# Altium footprint library Espressif Microcontrollers.PcbLib: 10 footprints
Each footprint in its own frame and in the unit in brackets; x right, y up, seen from the top. Pads: shape width x height; smd on the part's side, far side on the other; paste and mask are expansions set on the pad; w line width, h text height; cw(c..) or ccw(c..) is an arc to the next point about the centre after c.
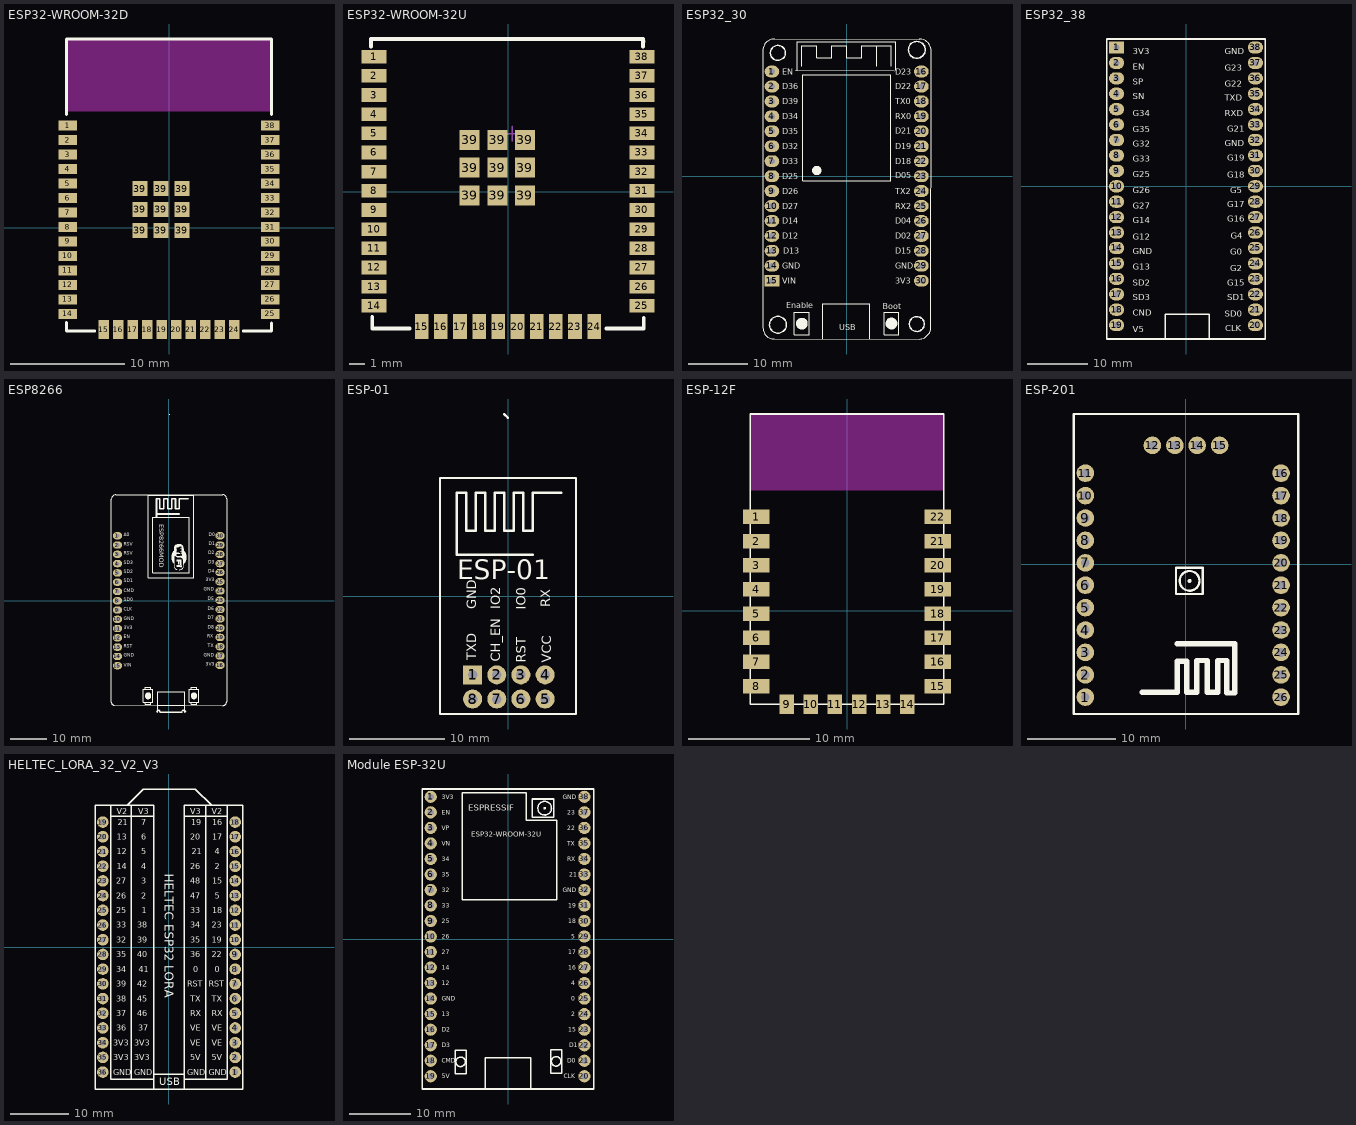
[diagram p0: the footprints below, top view; thin cyan lines are the x and y axes]

## ESP32-WROOM-32D [mm] "Chip SMD 39 Pads 18x25.5mm w/ Antenna."
pads (47):
  rect 1.65x0.9 smd: 1(-8.875,8.943) 2(-8.875,7.673) 3(-8.875,6.403) 4(-8.875,5.133) 5(-8.875,3.863) 6(-8.875,2.593) 7(-8.875,1.323) 8(-8.875,0.053) 9(-8.875,-1.217) 10(-8.875,-2.487) 11(-8.875,-3.757) 12(-8.875,-5.027) 13(-8.875,-6.297) 14(-8.875,-7.567) 25(8.875,-7.567) 26(8.875,-6.297) 27(8.875,-5.027) 28(8.875,-3.757) 29(8.875,-2.487) 30(8.875,-1.217) 31(8.875,0.053) 32(8.875,1.323) 33(8.875,2.593) 34(8.875,3.863) 35(8.875,5.133) 36(8.875,6.403) 37(8.875,7.673) 38(8.875,8.943)
  rect 0.9x1.65 smd: 15(-5.72,-8.942) 16(-4.45,-8.942) 17(-3.18,-8.942) 18(-1.91,-8.942) 19(-0.64,-8.942) 20(0.63,-8.942) 21(1.9,-8.942) 22(3.17,-8.942) 23(4.44,-8.942) 24(5.71,-8.942)
  rect 1.33x1.33 smd: 39(-2.544,-0.244) 39(-2.544,1.591) 39(-2.544,3.426) 39(-0.709,-0.244) 39(-0.709,1.591) 39(-0.709,3.426) 39(1.126,-0.244) 39(1.126,1.591) 39(1.126,3.426)
Top Overlay:
  lines w0.254: -9,9.933 -9,16.537 9,16.537 9,9.933 ; -6.514,-9.067 -9,-9.067 -9,-8.303 ; 6.509,-9.067 9,-9.067 9,-8.378 ; -9,-8.303 ccw(c-9,-8.303) -9,-8.303 ; 9.001,-8.377 ccw(c9.001,-8.378) 9,-8.378
Keep-Out Layer:
  rectangle: -9,10.168 9,16.468
3D body "ESP32-WROOM-32D.step": height 3, standoff -0.04, extent -9.03,-9.052 9.04,16.488

## ESP32-WROOM-32U [mm] "Chip SMD 39 Pads 18x19.2mm w/o Antenna."
pads (47):
  rect 1.65x0.9 smd: 1(-8.875,8.943) 2(-8.875,7.673) 3(-8.875,6.403) 4(-8.875,5.133) 5(-8.875,3.863) 6(-8.875,2.593) 7(-8.875,1.323) 8(-8.875,0.053) 9(-8.875,-1.217) 10(-8.875,-2.487) 11(-8.875,-3.757) 12(-8.875,-5.027) 13(-8.875,-6.297) 14(-8.875,-7.567) 25(8.875,-7.567) 26(8.875,-6.297) 27(8.875,-5.027) 28(8.875,-3.757) 29(8.875,-2.487) 30(8.875,-1.217) 31(8.875,0.053) 32(8.875,1.323) 33(8.875,2.593) 34(8.875,3.863) 35(8.875,5.133) 36(8.875,6.403) 37(8.875,7.673) 38(8.875,8.943)
  rect 0.9x1.65 smd: 15(-5.72,-8.942) 16(-4.45,-8.942) 17(-3.18,-8.942) 18(-1.91,-8.942) 19(-0.64,-8.942) 20(0.63,-8.942) 21(1.9,-8.942) 22(3.17,-8.942) 23(4.44,-8.942) 24(5.71,-8.942)
  rect 1.33x1.33 smd: 39(-2.544,-0.244) 39(-2.544,1.591) 39(-2.544,3.426) 39(-0.709,-0.244) 39(-0.709,1.591) 39(-0.709,3.426) 39(1.126,-0.244) 39(1.126,1.591) 39(1.126,3.426)
Top Overlay:
  lines w0.254: -9.07,9.605 -9.07,10.114 8.93,10.114 ; -6.514,-9.067 -9,-9.067 -9,-8.303 ; 6.509,-9.067 9,-9.067 9,-8.378 ; 8.947,9.605 8.947,10.114 ; -9,-8.303 ccw(c-9,-8.303) -9,-8.303 ; 9.001,-8.377 ccw(c9.001,-8.378) 9,-8.378
Mechanical 1:
  lines w0.254: 8.877,10.068 9.004,9.941
Top Component Center:
  lines w0.1: -0.209,3.831 0.791,3.831 ; 0.291,3.331 0.291,4.331
3D body "ESP32-WROOM-32U.step": height 3.4, standoff -0.04, extent -9.069,-9.105 9.001,10.135

## ESP32_30 [mm] "Microcontoller Board 30 Pins Wifi 2.4GHz BLE 4.2 ESP32-WROOM-32D"
pads (30):
  oval 2.5x2 hole 1: 1(-12.7,17.78) 2(-12.7,15.24) 3(-12.7,12.7) 4(-12.7,10.16) 5(-12.7,7.62) 6(-12.7,5.08) 7(-12.7,2.54) 8(-12.7,0) 9(-12.7,-2.54) 10(-12.7,-5.08) 11(-12.7,-7.62) 12(-12.7,-10.16) 13(-12.7,-12.7) 14(-12.7,-15.24) 16(12.7,17.78) 17(12.7,15.24) 18(12.7,12.7) 19(12.7,10.16) 20(12.7,7.62) 21(12.7,5.08) 22(12.7,2.54) 23(12.7,0) 24(12.7,-2.54) 25(12.7,-5.08) 26(12.7,-7.62) 27(12.7,-10.16) 28(12.7,-12.7) 29(12.7,-15.24) 30(12.7,-17.78)
  rect 2.5x2 hole 1: 15(-12.7,-17.78)
Top Overlay:
  circle w0.254: c-11.684,-25.273 r1.437
  circle w0.254: c-11.684,20.955 r1.27
  circle w0.254: c11.938,21.463 r1.437
  circle w0.254: c11.938,-25.146 r1.27
  lines w0.12: -14.234,21.59 -14.224,-25.755 ; -14.234,21.591 cw(c-12.254,21.312) -12.254,23.312 12.312,23.294 cw(c12.373,21.296) 14.351,21.59 14.319,-25.655 cw(c12.319,-25.686) 12.319,-27.686 -12.291,-27.684 cw(c-12.321,-25.78) -14.225,-25.755 ; -8.636,18.034 8.128,17.949 ; -8.382,18.034 -8.382,22.86 8.382,22.86 8.382,18.034 ; -7.62,18.638 -7.62,22.194 -5.08,22.194 -5.08,20.162 -2.54,20.162 -2.54,22.194 0,22.194 0,20.162 2.54,20.162 2.54,22.194 7.62,22.194 7.62,18.638 ; -4.064,-27.686 -4.064,-21.686 3.936,-21.686 3.936,-27.686 ; 5.08,18.638 5.08,22.194 ; -8.89,-26.924 -8.89,-23.114 -6.35,-23.114 -6.35,-26.924 -8.89,-26.924 ; -7.5,-0.774 -7.5,17.226 7.5,17.226 7.5,-0.774 -7.5,-0.774 ; 6.35,-26.924 6.35,-23.114 8.89,-23.114 8.89,-26.924 6.35,-26.924
  lines w0.8: -4.68,0.956 cw(c-5.08,0.958) -4.68,0.96
  lines w1: -7.12,-25.08 cw(c-7.62,-25.078) -7.12,-25.075 ; 8.12,-25.08 cw(c7.621,-25.055) 8.12,-25.075
  text "RX0" at 8.255,9.652 h1
  text "TX0" at 8.255,12.192 h1
  text "D22" at 8.255,14.732 h1
  text "D21" at 8.255,7.239 h1
  text "D18" at 8.255,2.032 h1
  text "D05" at 8.255,-0.381 h1
  text "D19" at 8.255,4.572 h1
  text "D25" at -10.922,-0.508 h1
  text "D33" at -10.922,2.032 h1
  text "D35" at -10.922,7.112 h1
  text "D34" at -10.922,9.652 h1
  text "D32" at -10.922,4.572 h1
  text "D26" at -10.922,-3.048 h1
  text "D13" at -10.795,-13.208 h1
  text "D27" at -10.922,-5.588 h1
  text "D14" at -10.922,-8.128 h1
  text "GND" at -10.922,-15.748 h1
  text "VIN" at -10.922,-18.288 h1
  text "D12" at -10.922,-10.668 h1
  text "D39" at -10.922,12.192 h1
  text "3V3" at 8.255,-18.288 h1
  text "D04" at 8.255,-8.128 h1
  text "GND" at 8.255,-15.748 h1
  text "D02" at 8.255,-10.668 h1
  text "D15" at 8.255,-13.208 h1
  text "RX2" at 8.255,-5.588 h1
  text "TX2" at 8.255,-3.048 h1
  text "D36" at -10.922,14.732 h1
  text "D23" at 8.255,17.272 h1
  text "EN" at -10.922,17.272 h1
  text "USB" at -1.27,-26.162 h1
  text "Boot" at 6.096,-22.606 h1
  text "Enable" at -10.287,-22.479 h1
3D body "ESP32_30.STEP": height 7, standoff -5.5, extent -14.149,-27.608 14.351,23.29

## ESP32_38 [mm] "Microcontoller Board 38 Pins Wifi 2.4GHz BLE 4.2 ESP32-WROOM-32D"
pads (38):
  rect 2.5x2 hole 1: 1(-11.43,22.86)
  oval 2.5x2 hole 1: 2(-11.43,20.32) 3(-11.43,17.78) 4(-11.43,15.24) 5(-11.43,12.7) 6(-11.43,10.16) 7(-11.43,7.62) 8(-11.43,5.08) 9(-11.43,2.54) 10(-11.43,0) 11(-11.43,-2.54) 12(-11.43,-5.08) 13(-11.43,-7.62) 14(-11.43,-10.16) 15(-11.43,-12.7) 16(-11.43,-15.24) 17(-11.43,-17.78) 18(-11.43,-20.32) 19(-11.43,-22.86) 20(11.43,-22.86) 21(11.43,-20.32) 22(11.43,-17.78) 23(11.43,-15.24) 24(11.43,-12.7) 25(11.43,-10.16) 26(11.43,-7.62) 27(11.43,-5.08) 28(11.43,-2.54) 29(11.43,0) 30(11.43,2.54) 31(11.43,5.08) 32(11.43,7.62) 33(11.43,10.16) 34(11.43,12.7) 35(11.43,15.24) 36(11.43,17.78) 37(11.43,20.32) 38(11.43,22.86)
Top Overlay:
  lines w0.254: 12.954,-25.146 -13.081,-25.146 -13.081,24.257 13.081,24.257 13.081,-25.146 ; -3.429,-25.146 -3.429,-21.082 3.81,-21.082 3.81,-25.146 -3.429,-25.146
  text "CND" at -8.763,-21.336 h1.02
  text "G13" at -8.763,-13.716 h1.02
  text "G12" at -8.763,-8.763 h1.02
  text "GND" at -8.763,-11.176 h1.02
  text "V5" at -8.763,-24.003 h1.02
  text "G16" at 6.812,-5.842 h1.02
  text "G4" at 7.388,-8.619 h1.02
  text "G18" at 6.767,1.397 h1.02
  text "G17" at 6.767,-3.429 h1.02
  text "G21" at 6.767,9.017 h1.02
  text "GND" at 6.35,6.604 h1.02
  text "G19" at 6.812,4.191 h1.02
  text "G5" at 7.302,-1.143 h1.02
  text "G23" at 6.35,19.05 h1.02
  text "GND" at 6.35,21.717 h1.02
  text "EN" at -8.763,19.177 h1.02
  text "3V3" at -8.763,21.717 h1.02
  text "G0" at 7.302,-11.303 h1.02
  text "G15" at 6.767,-16.383 h1.02
  text "SD1" at 6.812,-18.796 h1.02
  text "G2" at 7.302,-13.97 h1.02
  text "RXD" at 6.396,11.557 h1.02
  text "G22" at 6.35,16.383 h1.02
  text "TXD" at 6.396,14.097 h1.02
  text "G25" at -8.763,1.524 h1.02
  text "G33" at -8.763,4.064 h1.02
  text "G27" at -8.763,-3.683 h1.02
  text "G26" at -8.763,-1.143 h1.02
  text "G14" at -8.763,-6.096 h1.02
  text "G34" at -8.763,11.557 h1.02
  text "SN" at -8.763,14.351 h1.02
  text "G35" at -8.763,8.89 h1.02
  text "CLK" at 6.444,-23.876 h1.02
  text "SD0" at 6.396,-21.463 h1.02
  text "G32" at -8.763,6.477 h1.02
  text "SD2" at -8.763,-16.383 h1.02
  text "SD3" at -8.763,-18.796 h1.02
  text "SP" at -8.763,16.764 h1.02
3D body "User Library-ESP32S Dev Board 0_9inch width ASSY.step": height 7.2, standoff -5.94, extent -12.954,-25.038 12.954,24.276

## ESP8266 [mm] "Microcontoller Board 30 Pins Wifi 2.4GHz BLE 4.2 ESP-12F"
pads (30):
  oval 2.5x2 hole 1: 1(-14.034,17.78) 2(-14.034,15.24) 3(-14.034,12.7) 4(-14.034,10.16) 5(-14.034,7.62) 6(-14.034,5.08) 7(-14.034,2.54) 8(-14.034,0) 9(-14.034,-2.54) 10(-14.034,-5.08) 11(-14.034,-7.62) 12(-14.034,-10.16) 13(-14.034,-12.7) 14(-14.034,-15.24) 15(-14.034,-17.78) 16(14.034,-17.653) 17(14.034,-15.113) 18(14.034,-12.573) 19(14.034,-10.033) 20(14.034,-7.493) 21(14.034,-4.953) 22(14.034,-2.413) 23(14.034,0.127) 24(14.034,2.667) 25(14.034,5.207) 26(14.034,7.747) 27(14.034,10.16) 28(14.034,12.7) 29(14.034,15.24) 30(14.034,17.78)
Top Overlay:
  drawing of 96 lines, arcs and shapes, not listed
  text "RSV" at -12.383,12.125 h1.52
  text "3V3" at 10.096,4.886 h1.52
  text "TX" at 10.731,-13.148 h1.52
  text "RX" at 10.604,-10.608 h1.52
  text "D8" at 10.731,-8.068 h1.52
  text "D7" at 10.731,-5.528 h1.52
  text "D6" at 10.731,-2.988 h1.52
  text "D2" at 10.858,12.252 h1.52
  text "D5" at 10.731,-0.321 h1.52
  text "D4" at 10.858,7.299 h1.52
  text "D3" at 10.858,9.712 h1.52
  text "D1" at 10.986,14.792 h1.52
  text "D0" at 10.986,17.205 h1.52
  text "GND" at 9.588,2.346 h1.52
  text "GND" at 9.588,-15.688 h1.52
  text "3V3" at 10.096,-18.228 h1.52
  text "VIN" at -12.383,-18.482 h1.52
  text "GND" at -12.383,-15.688 h1.52
  text "RST" at -12.383,-13.275 h1.52
  text "EN" at -12.383,-10.735 h1.52
  text "3V3" at -12.383,-8.195 h1.52
  text "GND" at -12.383,-5.782 h1.52
  text "CLK" at -12.383,-3.115 h1.52
  text "SD0" at -12.383,-0.575 h1.52
  text "CMD" at -12.383,1.965 h1.52
  text "SD1" at -12.383,4.632 h1.52
  text "SD2" at -12.383,7.045 h1.52
  text "SD3" at -12.383,9.585 h1.52
  text "RSV" at -12.383,14.665 h1.52
  text "A0" at -12.383,17.205 h1.52
  text "ESP8266MOD" at -2.594,20.955 h1.25
3D body "ESP8266.STEP": height 7.12, standoff -3.02, extent -15.689,-30.946 15.811,29.034

## ESP-01 [mm] "Microcontoller Board 8 Pins Wifi 2.4GHz BLE 4.2 ESP8266EX"
pads (8):
  rect 2x2 hole 1: 1(-3.721,-8.292)
  round 2 hole 1: 2(-1.181,-8.292) 3(1.359,-8.292) 4(3.899,-8.292) 5(3.899,-10.832) 6(1.359,-10.832) 7(-1.181,-10.832) 8(-3.721,-10.832)
Top Overlay:
  lines w0.254: -0.406,19.137 -0.025,18.756 ; 2.614,4.347 -5.386,4.347 -5.386,10.847 -4.386,10.847 -4.386,6.847 -3.386,6.847 -3.386,10.847 -2.386,10.847 -2.386,6.847 -1.386,6.847 -1.386,10.847 -0.386,10.847 -0.386,6.847 0.614,6.847 0.614,10.847 1.614,10.847 1.614,6.847 2.614,6.847 2.614,10.847 5.614,10.847 ; -7.15,-12.406 -7.15,4.739 -7.15,12.406 7.15,12.406 7.15,-12.406 -7.15,-12.406
  text "VCC" at 4.547,-7.025 h1.02
  text "RST" at 1.88,-7.025 h1.02
  text "CH_EN" at -0.829,-6.898 h1.02
  text "TXD" at -3.327,-6.771 h1.02
  text "ESP-01" at -5.333,1.764 h2.03
  text "RX" at 4.42,-1.183 h1.02
  text "IO0" at 1.88,-1.437 h1.02
  text "IO2" at -0.818,-1.401 h1.02
  text "GND" at -3.327,-1.375 h1.02
3D body "ESP-01.step": height 5.88, standoff -5.8, extent -7.264,-12.313 7.236,12.487

## ESP-12F [mm] "Chip SMD 22 Pads 16x24mm w/ Antenna."
pads (22):
  rect 2.2x1.2 smd: 1(-7.5,7.75) 2(-7.5,5.75) 3(-7.5,3.75) 4(-7.5,1.75) 5(-7.5,-0.25) 6(-7.5,-2.25) 7(-7.5,-4.25) 8(-7.5,-6.25) 15(7.5,-6.25) 16(7.5,-4.25) 17(7.5,-2.25) 18(7.5,-0.25) 19(7.5,1.75) 20(7.5,3.75) 21(7.5,5.75) 22(7.5,7.75)
  rect 1.2x1.6 smd: 9(-5,-7.75) 10(-3,-7.75) 11(-1,-7.75) 12(1,-7.75) 13(3,-7.75) 14(5,-7.75)
Top Overlay:
  lines w0.127: -8,-7.75 8,-7.75 8,16.25 -8,16.25 -8,-7.75
Keep-Out Layer:
  rectangle: -8,9.916 8,16.216
3D body "ESP-12F.step": height 2.85, standoff -0.01, extent -8.019,-7.799 8.001,16.211

## ESP-201 [mm]
pads (26):
  round 2 hole 1 paste-2539.97 mask+0.051: 1(-11.417,-15.104) 2(-11.417,-12.564) 3(-11.417,-10.024) 4(-11.417,-7.484) 5(-11.417,-4.944) 6(-11.417,-2.404) 7(-11.417,0.136) 8(-11.417,2.676) 9(-11.417,5.216) 10(-11.417,7.756) 11(-11.417,10.296) 12(-3.81,13.45) 13(-1.27,13.45) 14(1.27,13.45) 15(3.81,13.45) 17(10.773,7.756) 18(10.773,5.216) 19(10.773,2.676) 20(10.773,0.136) 21(10.773,-2.404) 22(10.773,-4.944) 23(10.773,-7.484) 24(10.773,-10.024) 25(10.773,-12.564) 26(10.773,-15.104)
  round 2 hole 1 paste-2539.97 mask+0.102: 16(10.773,10.296)
Top Overlay:
  circle w0.254: c0.403,-1.914 r1.118
  circle w0.254: c0.403,-1.914 r0.1
  lines w0.254: -12.722,-17.009 12.722,-17.009 12.722,17.009 -12.722,17.009 -12.722,-17.009 ; -1.121,-3.414 1.903,-3.414 1.903,-0.414 -1.121,-0.414 -1.121,-3.414
  lines w0.61: -4.975,-14.546 -0.987,-14.546 -0.987,-11.04 0.105,-11.04 0.105,-14.546 1.223,-14.546 1.223,-10.939 2.417,-10.939 2.417,-14.546 3.61,-14.546 3.61,-10.939 4.601,-10.939 4.601,-14.622 5.515,-14.622 5.515,-9.745 ; -0.987,-9.034 5.515,-9.034 5.515,-9.643
3D body "ESP-201.SLDPRT": height 5.95, standoff -6.24, extent -12.75,-17 12.75,17

## HELTEC_LORA_32_V2_V3 [mm] "Heltec Lora 32 36 Pins"
pads (36):
  round 2 hole 1: 1(11.43,-21.59) 2(11.43,-19.05) 3(11.43,-16.51) 4(11.43,-13.97) 5(11.43,-11.43) 6(11.43,-8.89) 7(11.43,-6.35) 8(11.43,-3.81) 9(11.43,-1.27) 10(11.43,1.27) 11(11.43,3.81) 12(11.43,6.35) 13(11.43,8.89) 14(11.43,11.43) 15(11.43,13.97) 16(11.43,16.51) 17(11.43,19.05) 18(11.43,21.59) 19(-11.43,21.59) 20(-11.43,19.05) 21(-11.43,16.51) 22(-11.43,13.97) 23(-11.43,11.43) 24(-11.43,8.89) 25(-11.43,6.35) 26(-11.43,3.81) 27(-11.43,1.27) 28(-11.43,-1.27) 29(-11.43,-3.81) 30(-11.43,-6.35) 31(-11.43,-8.89) 32(-11.43,-11.43) 33(-11.43,-13.97) 34(-11.43,-16.51) 35(-11.43,-19.05) 36(-11.43,-21.59)
Top Overlay:
  lines w0.254: -9.906,22.606 -2.667,22.606 ; -6.477,24.511 -6.477,-22.86 ; -2.667,-24.511 -2.667,-21.971 2.667,-21.971 2.667,-24.511 ; 2.667,22.606 10.033,22.606 ; 6.35,24.511 6.35,-22.86 ; -6.477,-22.86 -2.667,-22.86 -2.667,24.511 -6.731,24.511 -10.033,24.511 -10.033,-22.86 -6.477,-22.86 ; 6.35,-22.86 10.033,-22.86 10.033,24.511 6.604,24.511 2.667,24.511 2.667,-22.86 6.35,-22.86 ; -12.7,-24.511 -6.35,-24.511 6.35,-24.511 12.7,-24.511 12.7,24.511 7.366,24.511 4.572,27.305 -4.445,27.305 -7.239,24.511 -12.7,24.511 -12.7,-24.511
  text "HELTEC ESP32 LORA" at -0.762,12.7 h1.52
  text "38" at -9.144,-9.398 h1.02
  text "39" at -9.144,-6.858 h1.02
  text "34" at -9.144,-4.318 h1.02
  text "35" at -9.144,-1.778 h1.02
  text "32" at -9.144,0.762 h1.02
  text "33" at -9.144,3.302 h1.02
  text "25" at -9.144,5.842 h1.02
  text "26" at -9.144,8.382 h1.02
  text "27" at -9.144,10.922 h1.02
  text "14" at -9.017,13.462 h1.02
  text "12" at -9.017,16.002 h1.02
  text "13" at -9.017,18.542 h1.02
  text "36" at -9.144,-14.478 h1.02
  text "37" at -9.144,-11.938 h1.02
  text "21" at -8.89,21.082 h1.02
  text "RST" at 6.858,-6.858 h1.02
  text "0" at 7.874,-4.318 h1.02
  text "22" at 7.366,-1.778 h1.02
  text "19" at 7.366,0.762 h1.02
  text "23" at 7.366,3.302 h1.02
  text "18" at 7.493,5.842 h1.02
  text "5" at 7.874,8.382 h1.02
  text "15" at 7.493,10.922 h1.02
  text "2" at 7.874,13.462 h1.02
  text "4" at 7.874,16.002 h1.02
  text "17" at 7.493,18.542 h1.02
  text "16" at 7.493,21.082 h1.02
  text "VE" at 7.366,-17.018 h1.02
  text "VE" at 7.366,-14.478 h1.02
  text "RX" at 7.366,-11.938 h1.02
  text "TX" at 7.366,-9.398 h1.02
  text "RST" at 3.175,-6.858 h1.02
  text "VE" at 3.683,-17.018 h1.02
  text "GND" at 3.175,-22.098 h1.02
  text "19" at 3.81,21.082 h1.02
  text "20" at 3.683,18.542 h1.02
  text "21" at 3.937,16.002 h1.02
  text "47" at 3.683,8.382 h1.02
  text "48" at 3.683,10.922 h1.02
  text "TX" at 3.683,-9.398 h1.02
  text "RX" at 3.683,-11.938 h1.02
  text "VE" at 3.683,-14.478 h1.02
  text "35" at 3.683,0.762 h1.02
  text "0" at 4.191,-4.318 h1.02
  text "34" at 3.683,3.302 h1.02
  text "36" at 3.683,-1.778 h1.02
  text "26" at 3.683,13.462 h1.02
  text "33" at 3.683,5.842 h1.02
  text "GND" at 6.858,-22.098 h1.02
  text "37" at -5.334,-14.478 h1.02
  text "3V3" at -5.969,-17.018 h1.02
  text "3V3" at -5.969,-19.558 h1.02
  text "GND" at -5.969,-22.098 h1.02
  text "3V3" at -9.652,-19.558 h1.02
  text "3V3" at -9.652,-17.018 h1.02
  text "GND" at -9.652,-22.098 h1.02
  text "39" at -5.461,0.762 h1.02
  text "41" at -5.207,-4.318 h1.02
  text "42" at -5.461,-6.858 h1.02
  text "45" at -5.461,-9.398 h1.02
  text "2" at -4.826,8.382 h1.02
  text "3" at -4.826,10.922 h1.02
  text "38" at -5.461,3.302 h1.02
  text "1" at -4.699,5.842 h1.02
  text "40" at -5.461,-1.778 h1.02
  text "46" at -5.461,-11.938 h1.02
  text "5" at -4.826,16.002 h1.02
  text "4" at -4.826,13.462 h1.02
  text "7" at -4.826,21.082 h1.02
  text "6" at -4.826,18.542 h1.02
  text "V3" at -5.334,22.987 h1.02
  text "V2" at -9.017,22.987 h1.02
  text "V2" at 7.366,22.987 h1.02
  text "V3" at 3.683,22.987 h1.02
  text "5V" at 3.683,-19.558 h1.02
  text "USB" at -1.651,-23.876 h1.27
  text "5V" at 7.366,-19.558 h1.02
3D body "HELTEC_LORA_ESP32.STEP": height 11.81, standoff -4, extent -12.7,-24.384 12.6,27.366

## Module ESP-32U [mm]
pads (38):
  round 2 hole 1 paste-2539.97 mask+0.102: 1(-12.646,23.263) 2(-12.646,20.723) 3(-12.646,18.183) 4(-12.646,15.643) 5(-12.646,13.103) 6(-12.646,10.563) 7(-12.646,8.023) 8(-12.646,5.483) 9(-12.646,2.943) 10(-12.646,0.403) 11(-12.646,-2.137) 12(-12.646,-4.677) 13(-12.646,-7.217) 14(-12.646,-9.757) 15(-12.646,-12.297) 16(-12.646,-14.837) 17(-12.646,-17.377) 18(-12.646,-19.917) 19(-12.646,-22.457) 20(12.5,-22.457) 21(12.5,-19.917) 22(12.5,-17.377) 23(12.5,-14.837) 24(12.5,-12.297) 25(12.5,-9.757) 26(12.5,-7.217) 27(12.5,-4.677) 28(12.5,-2.137) 29(12.5,0.403) 30(12.5,2.943) 31(12.5,5.483) 32(12.5,8.023) 33(12.5,10.563) 34(12.5,13.103) 35(12.5,15.643) 36(12.5,18.183) 37(12.5,20.723) 38(12.5,23.263)
Top Overlay:
  circle w0.254: c7.874,-20.019 r0.779
  circle w0.254: c-7.748,-20.097 r0.779
  circle w0.254: c6,21.403 r1.118
  circle w0.254: c6,21.403 r0.1
  lines w0.254: -3.7,-24.543 -3.7,-19.432 3.7,-19.432 3.7,-24.543 ; -14,-24.543 14,-24.543 14,24.543 -14,24.543 -14,-24.543 ; -8.637,-22.027 -8.637,-18.217 -6.859,-18.217 -6.859,-22.027 -8.637,-22.027 ; -7.5,6.403 8,6.403 8,19.403 3,19.403 3,23.903 -7.5,23.903 -7.5,6.403 ; 4,19.903 4,22.903 7.5,22.903 7.5,19.903 4,19.903 ; 6.985,-21.949 6.985,-18.139 8.763,-18.139 8.763,-21.949 6.985,-21.949
  text "ESP32-WROOM-32U" at -6.042,16.748 h0.84
  text "ESPRESSIF" at -6.526,20.999 h1.02
  text "CLK" at 9.095,-22.816 h0.7
  text "D0" at 9.73,-20.276 h0.7
  text "15" at 9.857,-15.196 h0.7
  text "2" at 10.365,-12.656 h0.7
  text "0" at 10.365,-10.116 h0.7
  text "4" at 10.365,-7.576 h0.7
  text "16" at 9.857,-5.036 h0.7
  text "17" at 9.857,-2.496 h0.7
  text "5" at 10.365,0.044 h0.7
  text "18" at 9.857,2.584 h0.7
  text "19" at 9.857,5.124 h0.7
  text "GND" at 8.968,7.664 h0.7
  text "21" at 9.984,10.204 h0.7
  text "RX" at 9.73,12.744 h0.7
  text "TX" at 9.73,15.284 h0.7
  text "22" at 9.73,17.824 h0.7
  text "23" at 9.73,20.364 h0.7
  text "GND" at 8.968,22.904 h0.7
  text "5V" at -10.844,-22.816 h0.7
  text "CMD" at -10.844,-20.276 h0.7
  text "D3" at -10.844,-17.736 h0.7
  text "D2" at -10.844,-15.196 h0.7
  text "13" at -10.844,-12.656 h0.7
  text "GND" at -10.844,-10.116 h0.7
  text "12" at -10.844,-7.576 h0.7
  text "14" at -10.844,-5.036 h0.7
  text "27" at -10.844,-2.496 h0.7
  text "26" at -10.844,0.044 h0.7
  text "25" at -10.844,2.584 h0.7
  text "33" at -10.844,5.124 h0.7
  text "32" at -10.844,7.664 h0.7
  text "35" at -10.844,10.204 h0.7
  text "34" at -10.844,12.744 h0.7
  text "VN" at -10.844,15.284 h0.7
  text "VP" at -10.844,17.824 h0.7
  text "EN" at -10.844,20.364 h0.7
  text "3V3" at -10.844,22.904 h0.7
  text "D1" at 9.984,-17.736 h0.7
3D body "Module ESP32-WROOM-32U.SLDPRT": height 7.9, standoff -6.14, extent -13.968,-24.567 14.032,24.502